# Altium integrated library SMAJ36A.IntLib: 1 symbol
Pins are listed as number, name and electrical type; pins without a type are passive.

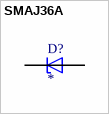
[diagram p0: symbol SMAJ36A]

## SMAJ36A
designator D?
400W Surface Mount Transient Voltage Supressors | Littelfuse SMAJ36A; SnapEDA_Link: https://www.snapeda.com/parts/SMAJ36A/Littelfuse/view-part/?ref=snap; Package: DO-214 Bourns; Value: *; MF: Littelfuse; MP: SMAJ36A; Check_prices: https://www.snapeda.com/parts/SMAJ36A/Littelfuse/view-part/?ref=eda
footprint DIOM4325X250N
pins: A, C